# Altium footprint library DT10966_MOTOR_CONTROLLER.PcbLib: 58 footprints (part 4 of 4)
Each footprint in its own frame and in the unit in brackets; x right, y up, seen from the top. Pads: shape width x height; smd on the part's side, far side on the other; paste and mask are expansions set on the pad; w line width, h text height; cw(c..) or ccw(c..) is an arc to the next point about the centre after c.
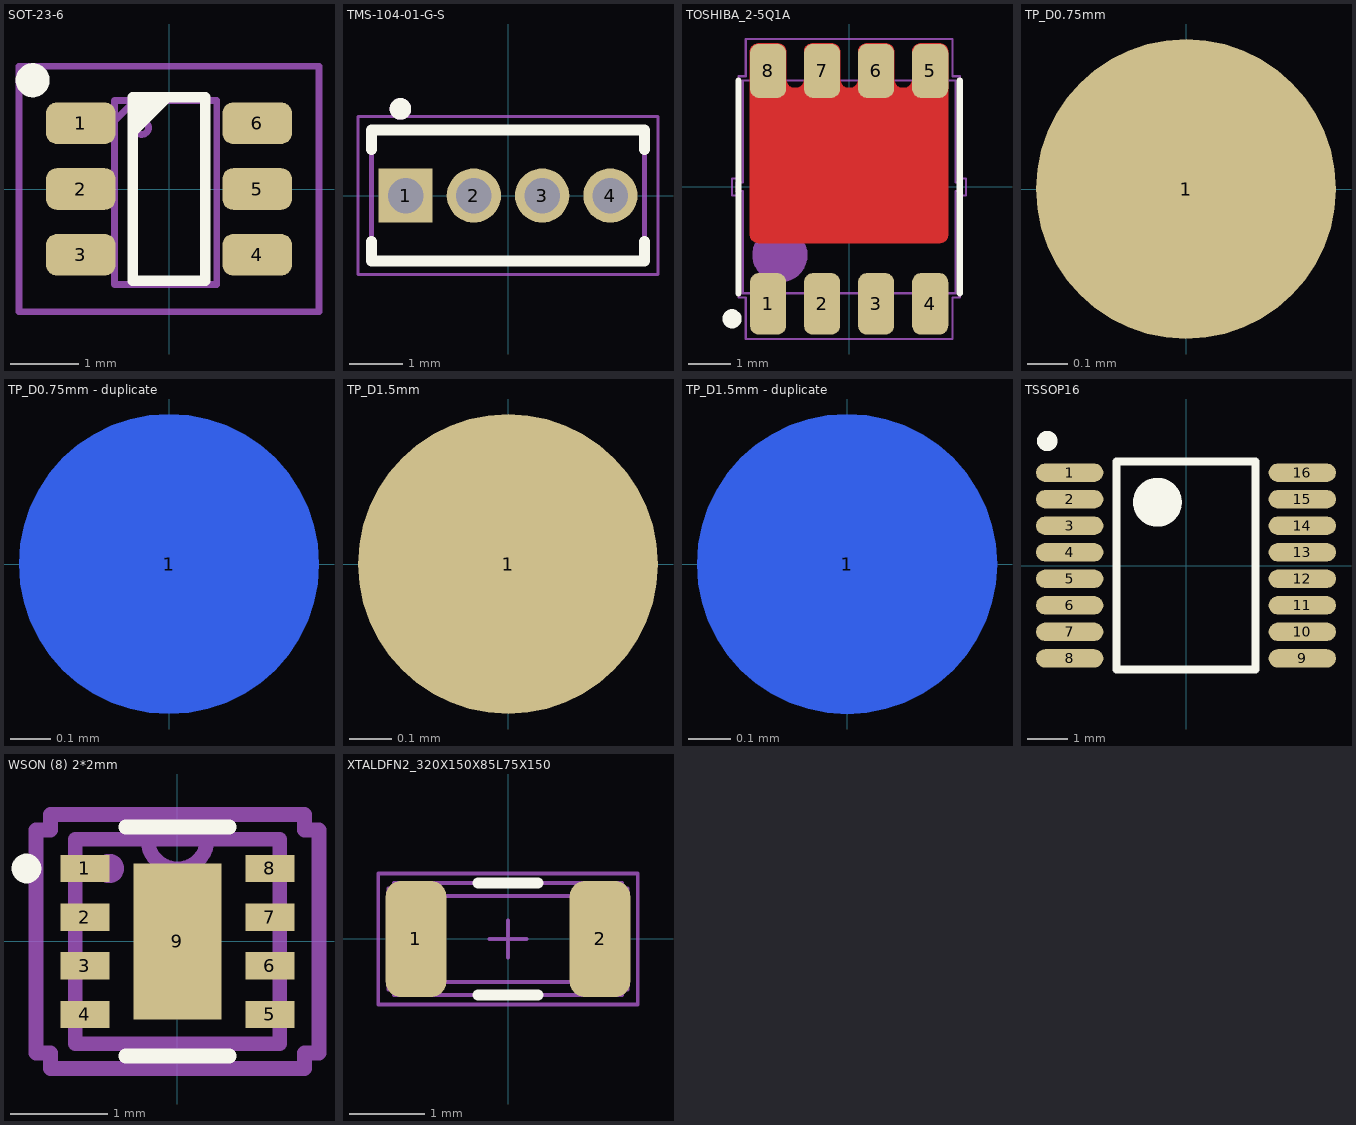
[diagram p3: the footprints below, top view; thin cyan lines are the x and y axes]

## SOT-23-6 [mil]
height 21.65
pads (6):
  rrect50% 40x24 smd: 1(-50.94,38) 2(-50.94,0) 3(-50.94,-38) 4(50.94,-38) 5(50.94,0) 6(50.94,38)
Top Overlay:
  circle w9.84: c-78.74,62.8 r4.92
  region: -21,53 3,53 -21,29
  lines w6: -21,-53 -21,53 21,53 21,-53 -21,-53
Top Assembly:
  circle w3.94: c-15.75,35.43 r3.94
  lines w3.94: -31.5,39.37 -19.68,51.18 ; -31.5,-55.12 27.56,-55.12 27.56,51.18 -31.5,51.18 -31.5,-55.12
  text "'.Designator'" at -145.67,82.68 h60
Top Courtyard:
  lines w3.94: -86.61,-70.87 -86.61,70.87 86.61,70.87 86.61,-70.87 -86.61,-70.87
3D body "User Library-SOT23-6-2.STEP": height 57.09, standoff 0, extent -55.11,-57.09 55.12,57.09

## TMS-104-01-G-S [mm]
pads (4):
  rect 1.01x1.01 hole 0.66 mask+0.06: 1(-1.905,0)
  round 1.01 hole 0.66 mask+0.06: 2(-0.635,0) 3(0.635,0) 4(1.905,0)
Top Overlay:
  circle w0.2: c-2.001,1.612 r0.1
  lines w0.2: -2.54,-0.855 -2.54,-1.219 2.54,-1.219 2.54,-0.855 ; -2.54,0.855 -2.54,1.219 2.54,1.219 2.54,0.855
Top 3D Body:
  circle w0.2: c-2.001,1.612 r0.1
  lines w0.1: -2.54,-1.219 -2.54,1.219 2.54,1.219 2.54,-1.219 -2.54,-1.219
Top Courtyard:
  lines w0.05: -2.79,-1.469 2.79,-1.469 2.79,1.469 -2.79,1.469 -2.79,-1.469
3D body "TMS-104-01-G-S.stp": height 8.38, standoff -3.05, extent -2.54,-1.219 2.54,1.219

## TOSHIBA_2-5Q1A [mm] "PDFN-8 5.00x6.00 h0.83 p1.27 DSOP Advance"
height 1
pads (8):
  rrect50% 0.85x1.45 smd: 1(-1.905,-2.75) 2(-0.635,-2.75) 3(0.635,-2.75) 4(1.905,-2.75)
  rrect50% 0.85x1.27 smd paste-2539.97 mask+0.102: 5(1.905,2.725) 6(0.635,2.725) 7(-0.635,2.725) 8(-1.905,2.725)
Top Layer:
  region: 176 vertices and 0 holes, not listed, extent -2.33,-1.325 2.33,3.375
Top Overlay:
  circle w0.25: c-2.75,-3.1 r0.1
  lines w0.15: -2.6,-2.5 -2.6,2.5 ; 2.6,-2.5 2.6,2.5
Top Paste:
  drawing of 12 lines, arcs and shapes, not listed
Top Assembly:
  circle w0.05: c-1.625,-1.6 r0.625
  region: -1,-1.6 -1,-1.724 -1.095,-1.954 -1.271,-2.13 -1.501,-2.225 -1.625,-2.225 -1.749,-2.225 -1.979,-2.13 -2.155,-1.954 -2.25,-1.724 -2.25,-1.6 -2.25,-1.476 -2.155,-1.246 -1.979,-1.07 -1.749,-0.975 -1.625,-0.975 -1.501,-0.975 -1.271,-1.07 -1.095,-1.246 -1,-1.476
  lines w0.05: -2.105,-2.5 -2.105,-3 -1.705,-3 -1.705,-2.5 ; -2.105,2.5 -2.105,3 -1.705,3 -1.705,2.5 ; -0.835,-2.5 -0.835,-3 -0.435,-3 -0.435,-2.5 ; -0.835,2.5 -0.835,3 -0.435,3 -0.435,2.5 ; 0.435,-2.5 0.435,-3 0.835,-3 0.835,-2.5 ; 0.435,2.5 0.435,3 0.835,3 0.835,2.5 ; 1.705,-2.5 1.705,-3 2.105,-3 2.105,-2.5 ; 1.705,2.5 1.705,3 2.105,3 2.105,2.5 ; -2.65,-0.1 -2.65,0.1 -2.5,0.1 -2.5,2.5 2.5,2.5 2.5,0.1 2.65,0.1 2.65,-0.1 2.5,-0.1 2.5,-2.5 -2.5,-2.5 -2.5,-0.1 -2.65,-0.1
  text "'.Designator'" at -2.417,-0.226 h1
Top Courtyard:
  lines w0.05: -0.25,0 0.25,0 ; 0,-0.25 0,0.25 ; -2.75,-0.2 -2.6,-0.2 -2.6,-2.6 -2.43,-2.6 -2.43,-3.575 2.43,-3.575 2.43,-2.6 2.6,-2.6 2.6,-0.2 2.75,-0.2 2.75,0.2 2.6,0.2 2.6,2.6 2.43,2.6 2.43,3.475 -2.43,3.475 -2.43,2.6 -2.6,2.6 -2.6,0.2 -2.75,0.2 -2.75,-0.2
3D body "DSOP Advance_z90.stp": height 0.73, standoff 0, extent -2.65,-3 2.65,3

## TP_D0.75mm [mm] "Testpoint"
height 0.55
pads (1):
  round 0.75 smd paste-0.75 mask+0: 1(0,0)

## TP_D0.75mm - duplicate [mm] "Testpoint"
height 0.55
pads (1):
  round 0.75 smd far side paste-0.75 mask+0: 1(0,0)

## TP_D1.5mm [mm] "Testpoint"
height 0.55
pads (1):
  round 0.7 smd paste-2539.97: 1(0,0)

## TP_D1.5mm - duplicate [mm] "Testpoint"
height 0.55
pads (1):
  round 0.7 smd far side paste-2539.97: 1(0,0)

## TSSOP16 [mm]
height 0.55
pads (16):
  oval 1.65x0.45 smd: 1(-2.85,2.275) 2(-2.85,1.625) 3(-2.85,0.975) 4(-2.85,0.325) 5(-2.85,-0.325) 6(-2.85,-0.975) 7(-2.85,-1.625) 8(-2.85,-2.275) 9(2.85,-2.275) 10(2.85,-1.625) 11(2.85,-0.975) 12(2.85,-0.325) 13(2.85,0.325) 14(2.85,0.975) 15(2.85,1.625) 16(2.85,2.275)
Top Overlay:
  circle w0.6: c-0.7,1.55 r0.3
  circle w0.25: c-3.4,3.05 r0.125
  lines w0.2: -1.7,-2.55 -1.7,2.55 1.7,2.55 1.7,-2.55 -1.7,-2.55
3D body "SOP65P640X120-16N.stp": height 1.2, standoff 0, extent -3.096,-2.55 3.146,2.55

## WSON (8) 2*2mm [mm]
height 0.55
pads (9):
  rect 0.5x0.28 smd paste+0 mask+0.05: 1(-0.95,0.75) 2(-0.95,0.25) 3(-0.95,-0.25) 4(-0.95,-0.75) 5(0.95,-0.75) 6(0.95,-0.25) 7(0.95,0.25) 8(0.95,0.75)
  rect 0.9x1.6 smd paste-0.787 mask-0.787: 9(0,0)
Top Layer:
  region: 0,-0.8
  region: 0,0.8
Top Overlay:
  lines w0.152: -1.533,0.676 cw(c-1.552,0.75) -1.526,0.678 ; -0.532,-1.177 0.532,-1.177 ; -0.532,1.177 0.532,1.177
Top Paste:
  region: 0.375,-0.494 0.241,-0.494 0.1,-0.635 0.1,-0.725 0.375,-0.725
  region: 0.375,0.294 0.241,0.294 0.1,0.152 0.1,-0.152 0.241,-0.294 0.375,-0.294
  region: 0.375,0.725 0.1,0.725 0.1,0.635 0.241,0.494 0.375,0.494
  region: -0.241,-0.494 -0.375,-0.494 -0.375,-0.725 -0.1,-0.725 -0.1,-0.635
  region: -0.241,0.294 -0.375,0.294 -0.375,-0.294 -0.241,-0.294 -0.1,-0.152 -0.1,0.152
  region: -0.1,0.725 -0.375,0.725 -0.375,0.494 -0.241,0.494 -0.1,0.635
Top Solder:
  region: 0,-0.8
  region: 0,0.8
  region: 0.2,-0.864 0.2,0.864 0.513,0.864 0.513,-0.864
  region: -0.513,-0.864 -0.513,0.864 -0.2,0.864 -0.2,-0.864
  region: -0.513,-0.864 -0.513,-0.594 0.513,-0.594 0.513,-0.864
  region: -0.513,-0.194 -0.513,0.194 0.513,0.194 0.513,-0.194
  region: -0.513,0.594 -0.513,0.864 0.513,0.864 0.513,0.594
Top Assembly:
  circle w0.15: c-0.7,0.75 r0.076
  lines w0.15: -0.305,1.05 ccw(c0,1.05) 0.305,1.05 ; -1.05,-1.05 -1.05,1.05 1.05,1.05 1.05,-1.05 -1.05,-1.05
  text "'.Designator'" at -2,-0.03 h2.5
Top Courtyard:
  lines w0.152: -1.454,-1.144 -1.304,-1.144 -1.304,-1.304 1.304,-1.304 1.304,-1.144 1.454,-1.144 1.454,1.144 1.304,1.144 1.304,1.304 -1.304,1.304 -1.304,1.144 -1.454,1.144 -1.454,-1.144
3D body "DSG8_1P6X0P9_TEX.step": height 0.8, standoff 0, extent -1.05,-1.05 1.05,1.05

## XTALDFN2_320X150X85L75X150 [mm] "Crystal 3.20x1.50x0.85mm DFN 2-SMD"
height 0.85
pads (2):
  rrect50% 0.81x1.55 smd: 1(-1.23,0) 2(1.23,0)
Top Overlay:
  lines w0.15: -0.4,-0.75 0.4,-0.75 ; -0.4,0.75 0.4,0.75
Top Assembly:
  lines w0.05: -1.6,-0.675 cw(c-1.6,-0.75) -1.525,-0.75 1.525,-0.75 cw(c1.6,-0.75) 1.6,-0.675 ; -1.6,-0.675 -1.6,0.675 ccw(c-1.6,0.75) -1.525,0.75 1.525,0.75 ccw(c1.6,0.75) 1.6,0.675 1.6,-0.675 ; -1.425,-0.525 -1.375,-0.575 1.375,-0.575 1.425,-0.525 1.425,0.525 1.375,0.575 -1.375,0.575 -1.425,0.525 -1.425,-0.525
  text "'.Designator'" at -2.417,-0.226 h1
Top Courtyard:
  lines w0.05: -0.25,0 0.25,0 ; 0,-0.25 0,0.25 ; -1.735,-0.875 -1.735,0 -1.735,0.875 0,0.875 1.735,0.875 1.735,0 1.735,-0.875 0,-0.875 -1.735,-0.875
3D body "9HT10.STEP": height 0.85, standoff 0, extent -1.6,-0.75 1.6,0.75